# Altium schematic symbol library DW254R-22-16-85.SchLib: 1 symbol
Pins are listed as number, name and electrical type; pins without a type are passive.

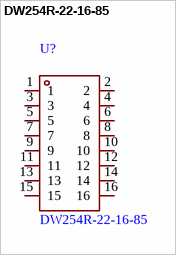
[diagram p0: symbol DW254R-22-16-85]

## DW254R-22-16-85
designator U?
2x8P 间距:2.54mm 直插 / 插孔结构:2x8P / 间距:2.54mm / 行距:2.54mm / 圆孔/方孔:方孔 / 安装方式:直插 / 排数:双排 / 总孔位数:16P / 额定电流:3A / 额定电压:- / 插孔方向:顶部 / 塑高:8.5mm / 触头材质:黄铜 / 触头镀层:金 / 工作温度:- / 型号:DW254R-22-16-85 / LCSC C2935989 / 厂牌:DEALON(德艺隆)
footprint HDR-TH_16P-P2.54-V-F-R2-C8-S2.54 (PCB footprint)
pins: 1, 2, 3, 4, 5, 6, 7, 8, 9, 10, 11, 12, 13, 14, 15, 16